# Altium schematic symbol library Schlib1.SchLib: 1 symbol
Pins are listed as number, name and electrical type; pins without a type are passive.

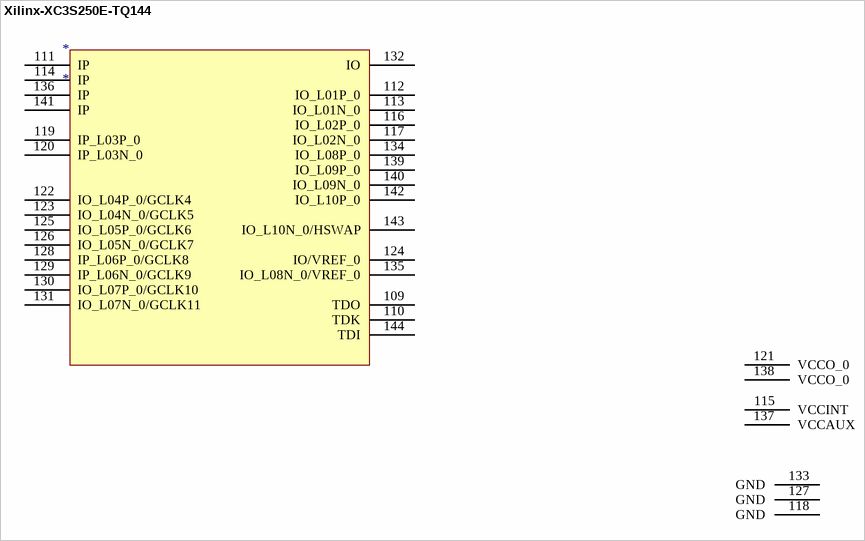
[diagram p0: symbol Xilinx-XC3S250E-TQ144]

## Xilinx-XC3S250E-TQ144
designator *
pins: 109 TDO, 110 TDK, 111 IP, 112 IO_L01P_0, 113 IO_L01N_0, 114 IP, 115 VCCINT, 116 IO_L02P_0, 117 IO_L02N_0, 118 GND, 119 IP_L03P_0, 120 IP_L03N_0, 121 VCCO_0, 122 IO_L04P_0/GCLK4, 123 IO_L04N_0/GCLK5, 124 IO/VREF_0, 125 IO_L05P_0/GCLK6, 126 IO_L05N_0/GCLK7, 127 GND, 128 IP_L06P_0/GCLK8, 129 IP_L06N_0/GCLK9, 130 IO_L07P_0/GCLK10, 131 IO_L07N_0/GCLK11, 132 IO, 133 GND, 134 IO_L08P_0, 135 IO_L08N_0/VREF_0, 136 IP, 137 VCCAUX, 138 VCCO_0, 139 IO_L09P_0, 140 IO_L09N_0, 141 IP, 142 IO_L10P_0, 143 IO_L10N_0/HSWAP, 144 TDI